# EAGLE library part BME280-MODULE (library moto-anomaly)
BME280-MODULE GY-BME280 6-pin (I2C/SPI) ortam sicaklik/basinc/nem. Kart: 15.0 x 12.0 mm - Guven: M STEP: GrabCAD 'GY-BME280'
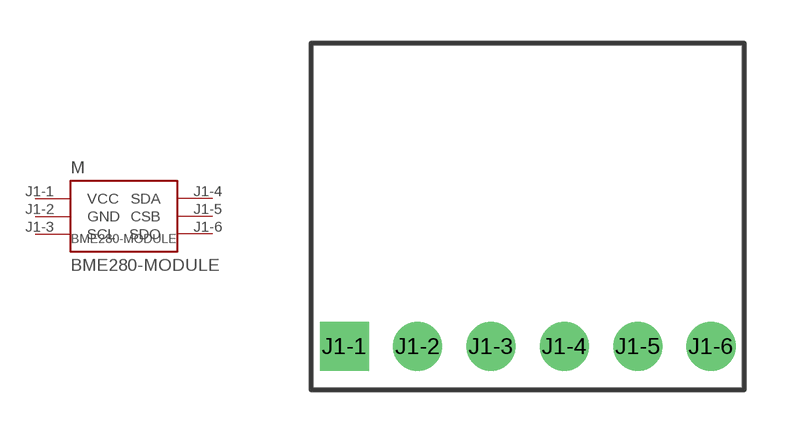
[diagram p1: symbol with the pads of BME280-MODULE; footprint BME280-MODULE]

Designator prefix M

## BME280-MODULE (BOARD_SIZE: 15.0x12.0mm; CONFIDENCE: M)  [BME280-MODULE]
J1-1  VCC  pas
J1-2  GND  pas
J1-3  SCL  pas
J1-4  SDA  pas
J1-5  CSB  pas
J1-6  SDO  pas

## Footprint BME280-MODULE (pad centres in mm)
GY-BME280 6-pin (I2C/SPI) ortam sicaklik/basinc/nem. | Kart: 15.0 x 12.0 mm | Guven: M
drill 1 pad 1.7 square: J1-1 -6.35,-4.5
drill 1 pad 1.7 round: J1-2 -3.81,-4.5; J1-3 -1.27,-4.5; J1-4 1.27,-4.5; J1-5 3.81,-4.5; J1-6 6.35,-4.5